# Altium schematic symbol library GNSS_Schlib.SchLib: 14 symbols
Pins are listed as number, name and electrical type; pins without a type are passive.

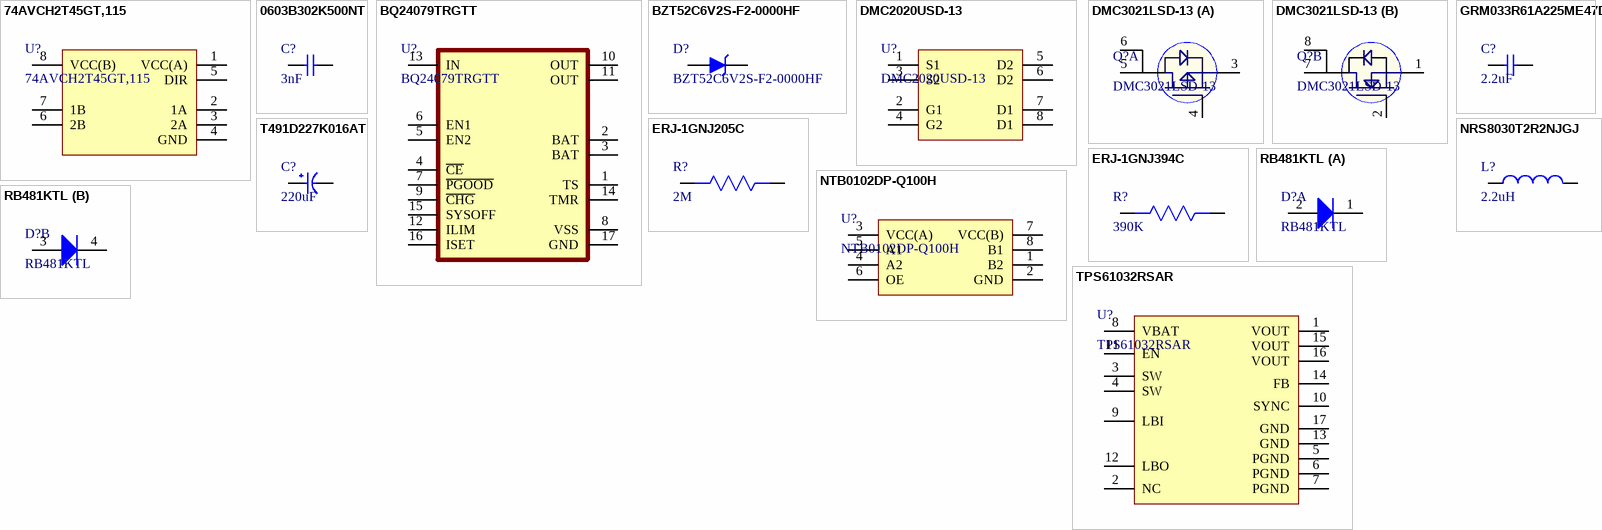
[diagram p0: symbols 74AVCH2T45GT,115 to TPS61032RSAR]

## 74AVCH2T45GT,115
designator U?
IC TXRX BUS 2BIT DUAL 3ST 8XSON; Manufacturer: Nexperia; Supplier 1: Digi-Key; Manufacturer Part Number: 74AVCH2T45GT,115; RoHS: Yes; Category: Voltage Level Shifters; Stock 1: 342616; Pricing 1: 5000=0.19239 (USD); RoHS Compliant: Yes; ComponentLink1URL: https://assets.nexperia.com/documents/data-sheet/74AVCH2T45.pdf?src-supplier=Digi-Key; ComponentLink1Description: https://assets.nexperia.com/documents/data-sheet/74AVCH2T45.pdf?src-supplier=Digi-Key; Supplier Part Number 1: 1727-6903-2-ND
footprint 74AVCH2T45GT,115
pins: 1 VCC(A), 2 1A, 3 2A, 4 GND, 5 DIR, 6 2B, 7 1B, 8 VCC(B)

## 0603B302K500NT
designator C?, comment 3nF
3nF ±10% 50V X7R 0603 Multilayer Ceramic Capacitors MLCC - SMD/SMT RoHS; Manufacturer: FH(Guangdong Fenghua Advanced Tech); Package: 0603; Capacitance: 3nF; Tolerance: ±10%; Voltage - Rated: 50V; Temperature Coefficient: X7R
footprint Cap 0603
pins: 1, 2

## BQ24079TRGTT
designator U?
Battery Charger Li-Ion 1500mA 4.1V 16-Pin VQFN EP T/R; Manufacturer: Texas Instruments; Min Supply Voltage: 4.35V; Max Supply Voltage: 6.4V; Output Current: 1.5A; Max Power Dissipation: 2.3W; Min Input Voltage: 4.3V; Operating Supply Current: 1.5mA; Number of Cells: 1; Supplier 1: Digi-Key; Manufacturer Part Number: BQ24079TRGTT; RoHS: Yes; Category: Battery Management; Stock 1: 10; Pricing 1: 1=3.03000, 10=2.72500, 25=2.57040, 100=2.19010 (USD); Case/Package: VQFN EP; Number of Pins: 16; Contact Plating: Gold; Min Operating Temperature: -40°C; Max Operating Temperature: 85°C; Output Voltage: 4.1V; Packaging: Tape and Reel; Package Quantity: 250; Series: -; Radiation Hardening: No; Lead Free: Lead Free; RoHS Compliant: Yes; ComponentLink1URL: https://datasheet.ciiva.com/15115/getdatasheetpartid-517600-15115033.pdf?src-supplier=Verical; ComponentLink1Description: https://datasheet.ciiva.com/15115/getdatasheetpartid-517600-15115033.pdf?src-supplier=Verical; ComponentLink2URL: https://datasheet.ciiva.com/1934/bq24075t-1934673.pdf?src-supplier=Digi-Key; ComponentLink2Description: https://datasheet.ciiva.com/1934/bq24075t-1934673.pdf?src-supplier=Digi-Key; Supplier Part Number 1: 296-BQ24079TRGTTCT-ND
footprint BQ24079TRGTT
pins: 1 TS, 2 BAT, 3 BAT, 4 ~{CE}, 5 EN2, 6 EN1, 7 ~{PGOOD}, 8 VSS, 9 ~{CHG}, 10 OUT, 11 OUT, 12 ILIM, 13 IN, 14 TMR, 15 SYSOFF, 16 ISET, 17 GND

## BZT52C6V2S-F2-0000HF
designator D?
Zener Diode 6.2V 0.2W SOD-323; Manufacturer: Yangjie Electronic Technology; Supplier 1: Digi-Key; Manufacturer Part Number: BZT52C6V2S-F2-0000HF; RoHS: No; Category: Zener Diodes; Stock 1: 2869; Pricing 1: 1=0.22000, 10=0.17700, 100=0.09400, 500=0.06188, 1000=0.04208 (USD); Supplier Part Number 1: 3191-BZT52C6V2S-F2-0000HFCT-ND
footprint BZT52C6V2S-F2-0000HF
pins: 1 K, 2 A

## DMC2020USD-13
designator U?
MOSFET N/P-CH 20V 7.8A/6.3A 8SO; Manufacturer: Diodes Incorporated; Manfacutrer part num:: DMC2020USD-13; Package: 8-SO
footprint DMC2020USD-13
pins: 1 S1, 2 G1, 3 S2, 4 G2, 5 D2, 6 D2, 7 D1, 8 D1

## DMC3021LSD-13
designator Q?
MOSFET N/P-CH 30V 8.5A/7A 8SO; Manufacturer: Diodes; Gate to Source Voltage (Vgs): 20V; Rds On Max: 21mR; Input Capacitance: 767pF; Number of Elements: 2; Max Power Dissipation: 2.5W; Continuous Drain Current (ID): 8.5A; Drain to Source Resistance: 14mR; Turn-Off Delay Time: 50.1ns; FET Type: N and P-Channel; Polarity: N-CHANNEL,P-CHANNEL; Supplier 1: RSComponents; Manufacturer Part Number: DMC3021LSD-13; RoHS: Yes; Category: MOSFETs; Stock 1: 225; Pricing 1: 25=0.61700, 125=0.47900, 625=0.39900, 1250=0.32000 (USD); Mount: Surface Mount; Case/Package: SOIC; Number of Pins: 8; Weight: 0.00261oz; Min Operating Temperature: -55°C; Max Operating Temperature: 150°C; Packaging: Tape and Reel; Package Quantity: 2500; Power Dissipation: 2.5W; Drain to Source Voltage (Vdss): 30V; Number of Channels: 2; Series: -; Length: 4.95mm; Width: 3.95mm; Height: 1.5mm; Radiation Hardening: No; REACH SVHC: No SVHC; RoHS Compliant: Yes; ComponentLink1URL: https://datasheet.ciiva.com/4443/ds32152-88645-4443219.pdf?src-supplier=Mouser; ComponentLink1Description: https://datasheet.ciiva.com/4443/ds32152-88645-4443219.pdf?src-supplier=Mouser; ComponentLink2URL: https://datasheet.ciiva.com/928/ds32152-928775.pdf?src-supplier=Digi-Key; ComponentLink2Description: https://datasheet.ciiva.com/928/ds32152-928775.pdf?src-supplier=Digi-Key; ComponentLink3URL: https://datasheet.ciiva.com/928/ds32152-928776.pdf?src-supplier=Digi-Key; ComponentLink3Description: https://datasheet.ciiva.com/928/ds32152-928776.pdf?src-supplier=Digi-Key; ComponentLink4URL: https://datasheet.ciiva.com/928/ds32152-928777.pdf?src-supplier=Digi-Key; ComponentLink4Description: https://datasheet.ciiva.com/928/ds32152-928777.pdf?src-supplier=Digi-Key; Supplier Part Number 1: 7514067
footprint DMC2020USD-13
part A pins: 3 S1, 4 G1, 5 D1, 6 D1
part B pins: 1 S2, 2 G2, 7 D2, 8 D2

## ERJ-1GNJ205C
designator R?, comment 2M
Res Thick Film 0201 2M Ohm 5% 1/20W -400ppm/°C to 150ppm/°C Molded SMD SMD T/R; Manufacturer: Panasonic; Manufacturer Part Number: ERJ-1GNJ205C; Resistance: 2MR; Power Rating: 50mW; Voltage Rating: 25V; Supplier 1: Digi-Key; RoHS: Yes; Category: Chip SMD Resistors; Stock 1: 118626; Pricing 1: 1=0.10000, 10=0.03400, 100=0.01400, 1000=0.00629, 2500=0.00546, 5000=0.00451 (USD); Mount: Surface Mount; Case/Package: 0201; Case Code (Metric): 0603; Case Code (Imperial): 0201; Min Operating Temperature: -55°C; Max Operating Temperature: 125°C; Package Quantity: 15000; Tolerance: 5%; Packaging: Tape and Reel; Resistor Type: Thick Film; Number of Terminations: 2; Temperature Coefficient: 150ppm/°C; Max Power Dissipation: 50mW; Termination: SMD/SMT; Length: 0.024inch; Width: 0.012inch; Height: 0.01inch; RoHS Compliant: Yes; ComponentLink1URL: http://www.onlinecomponents.com/datasheet/erj-1gnj205c.aspx?p=44467765&src-supplier=Onlinecomponents.com; ComponentLink1Description: http://www.onlinecomponents.com/datasheet/erj-1gnj205c.aspx?p=44467765&src-supplier=Onlinecomponents.com; ComponentLink2URL: http://www.mouser.com/ds/2/315/AOA0000CE1-37422.pdf?src-supplier=Mouser; ComponentLink2Description: http://www.mouser.com/ds/2/315/AOA0000CE1-37422.pdf?src-supplier=Mouser; ComponentLink3URL: https://b2b-api.panasonic.eu/file_stream/pids/fileversion/1242?src-supplier=Digi-Key; ComponentLink3Description: https://b2b-api.panasonic.eu/file_stream/pids/fileversion/1242?src-supplier=Digi-Key; ComponentLink4URL: http://industrial.panasonic.com/www-cgi/jvcr13pz.cgi?E+PZ+3+AOA0002+ERJ1GNJ205C+7+WW?src-supplier=Digi-Key; ComponentLink4Description: http://industrial.panasonic.com/www-cgi/jvcr13pz.cgi?E+PZ+3+AOA0002+ERJ1GNJ205C+7+WW?src-supplier=Digi-Key; ComponentLink5URL: https://industrial.panasonic.com/cdbs/www-data/pdf/RDM0000/DMM0000COL11.pdf?src-supplier=Digi-Key; ComponentLink5Description: https://industrial.panasonic.com/cdbs/www-data/pdf/RDM0000/DMM0000COL11.pdf?src-supplier=Digi-Key; Supplier Part Number 1: P123274CT-ND
footprint Res-0201
pins: 1, 2

## ERJ-1GNJ394C
designator R?, comment 390K
Res Thick Film 0201 390K Ohm 5% 1/20W ±200ppm/°C Molded SMD SMD T/R; Manufacturer: Panasonic; Manufacturer Part Number: ERJ-1GNJ394C; Resistance: 390kR; Power Rating: 50mW; Voltage Rating: 25V; Supplier 1: Digi-Key; RoHS: Yes; Category: Chip SMD Resistors; Stock 1: 14453; Pricing 1: 1=0.10000, 10=0.03400, 100=0.01400, 1000=0.00629, 2500=0.00546, 5000=0.00451 (USD); Mount: Surface Mount; Case/Package: 0201; Case Code (Imperial): 0201; Case Code (Metric): 0603; Min Operating Temperature: -55°C; Max Operating Temperature: 125°C; Packaging: Tape and Reel; Tolerance: 5%; Package Quantity: 15000; Resistor Type: Thick Film; Max Power Dissipation: 50mW; Number of Terminations: 2; Temperature Coefficient: 200ppm/°C; Length: 0.024inch; Width: 0.3mm; Height: 0.01inch; ComponentLink1URL: http://www.onlinecomponents.com/datasheet/erj-1gnj394c.aspx?p=44467790&src-supplier=Onlinecomponents.com; ComponentLink1Description: http://www.onlinecomponents.com/datasheet/erj-1gnj394c.aspx?p=44467790&src-supplier=Onlinecomponents.com; ComponentLink2URL: http://www.mouser.com/ds/2/315/AOA0000CE1-37422.pdf?src-supplier=Mouser; ComponentLink2Description: http://www.mouser.com/ds/2/315/AOA0000CE1-37422.pdf?src-supplier=Mouser; ComponentLink3URL: http://industrial.panasonic.com/www-cgi/jvcr13pz.cgi?E+PZ+3+AOA0002+ERJ1GNJ394C+7+WW?src-supplier=Digi-Key; ComponentLink3Description: http://industrial.panasonic.com/www-cgi/jvcr13pz.cgi?E+PZ+3+AOA0002+ERJ1GNJ394C+7+WW?src-supplier=Digi-Key; ComponentLink4URL: https://b2b-api.panasonic.eu/file_stream/pids/fileversion/1242?src-supplier=Digi-Key; ComponentLink4Description: https://b2b-api.panasonic.eu/file_stream/pids/fileversion/1242?src-supplier=Digi-Key; Supplier Part Number 1: P123319CT-ND
footprint Res-0201
pins: 1, 2

## GRM033R61A225ME47D
designator C?, comment 2.2uF
CAP CER 2.2UF 10V X5R 0201; Manufacturer: Murata; Manufacturer Part Number: GRM033R61A225ME47D; Tolerance: 20%; Supplier 1: Avnet; RoHS: Yes; Category: Ceramic Capacitors; Pricing 1: 15000=0.04772, 30000=0.04483, 60000=0.04193, 90000=0.03904, 120000=0.03615, 150000=0.03495, 1500000=0.03374 (USD); Mount: Surface Mount; Case/Package: 0201; Case Code (Metric): 0603; Case Code (Imperial): 0201; Min Operating Temperature: -55°C; Max Operating Temperature: 85°C; Packaging: Tape and Reel; Capacitance: 2.2uF; Voltage Rating: 10V; Voltage Rating (DC): 10V; Dielectric: X5R; Length: 0.024inch; Width: 0.012inch; Thickness: 0.015inch; RoHS Compliant: Yes; ComponentLink1URL: http://search.murata.co.jp/Ceramy/image/img/A01X/G101/ENG/GRM033R61A225ME47-01.pdf?src-supplier=Digi-Key; ComponentLink1Description: http://search.murata.co.jp/Ceramy/image/img/A01X/G101/ENG/GRM033R61A225ME47-01.pdf?src-supplier=Digi-Key; ComponentLink2URL: https://www.murata.com/~/media/webrenewal/support/library/catalog/products/capacitor/mlcc/c02e.ashx?la=en-us&src-supplier=Digi-Key; ComponentLink2Description: https://www.murata.com/~/media/webrenewal/support/library/catalog/products/capacitor/mlcc/c02e.ashx?la=en-us&src-supplier=Digi-Key; Supplier Part Number 1: GRM033R61A225ME47D
footprint CAP 0201
pins: 1, 2

## NRS8030T2R2NJGJ
designator L?, comment 2.2uH
Inductor Power Shielded Wirewound 2.2uH 30% 100KHz Ferrite 4.8A 0.0195Ohm DCR 3131 T/R; Manufacturer: Taiyo Yuden; Manufacturer Part Number: NRS8030T2R2NJGJ; Self Resonant Frequency: 60MHz; Max DC Current: 4.9A; DC Resistance (DCR): 19.5mR; Supplier 1: Future Electronics; RoHS: Yes; Category: Fixed Inductors; Stock 1: 16000; Pricing 1: 1000=0.24000, 2000=0.19800, 3000=0.19600, 5000=0.19300, 10000=0.19000 (USD); Mount: Surface Mount; Case/Package: Nonstandard; Number of Pins: 2; Core Material: Ferrite; Min Operating Temperature: -25°C; Max Operating Temperature: 125°C; Inductance: 2.2uH; Tolerance: 30%; Packaging: Cut Tape; Package Quantity: 1000; Current Rating: 4.8A; Shielding: Shielded; Termination: SMD/SMT; Resistor Type: Wirewound; Test Frequency: 100kHz; Saturation Current: 4.9A; Series: NRS; Inductance Tolerance: 30%; RMS Current (Irms): 4.8A; Length: 8mm; Width: 8mm; Height: 3mm; Height - Seated (Max): 0.118inch; Depth: 8.2mm; Lead Pitch: 5.6mm; Radiation Hardening: No; RoHS Compliant: Yes; Lead Free: Lead Free; Halogen Free: Halogen Free; REACH SVHC: Unknown; ComponentLink1URL: https://datasheet.ciiva.com/8504/nrs8030t2r2njgj-ss-8504418.pdf?src-supplier=Avnet; ComponentLink1Description: https://datasheet.ciiva.com/8504/nrs8030t2r2njgj-ss-8504418.pdf?src-supplier=Avnet; ComponentLink2URL: https://datasheet.ciiva.com/6699/nrs8030t2r2njgj-ss-6699093.pdf?src-supplier=Digi-Key; ComponentLink2Description: https://datasheet.ciiva.com/6699/nrs8030t2r2njgj-ss-6699093.pdf?src-supplier=Digi-Key; ComponentLink3URL: https://datasheet.ciiva.com/25607/0900766b810b3cd2-25607146.pdf?src-supplier=RSComponents; ComponentLink3Description: https://datasheet.ciiva.com/25607/0900766b810b3cd2-25607146.pdf?src-supplier=RSComponents; Supplier Part Number 1: 1077538
footprint NRS8030T2R2NJGJ (FIXED IND 2.2UH 4.8A 19.5MOHM SM)
pins: 1, 2

## NTB0102DP-Q100H
designator U?
Voltage Level Translator 2-CH Bidirectional Automotive 8-Pin TSSOP T/R; Manufacturer: NXP Semiconductors; Propagation Delay: 4.4ns; Data Rate: 100Mbps; Number of Channels: 2; Max Supply Voltage: 3.6V; Min Supply Voltage: 1.2V; Max Power Dissipation: 250mW; Nominal Supply Current: 3.3uA; Number of Circuits: 1; Turn-On Delay Time: 5.9ns; Low Level Output Current: 20uA; High Level Output Current: -20uA; Supplier 1: Digi-Key; Manufacturer Part Number: NTB0102DP-Q100H; RoHS: Yes; Category: Logic Gates; Stock 1: 8500; Pricing 1: 1=1.30000, 10=1.16200, 25=1.10240, 100=1.06880 (USD); Mount: Surface Mount; Case/Package: TSSOP; Number of Pins: 8; Min Operating Temperature: -40°C; Max Operating Temperature: 125°C; Packaging: Tape and Reel; Package Quantity: 3000; Channel Type: Bidirectional; Logic Function: Translator; Number of Bits: 2; Output Type: Voltage; Radiation Hardening: No; RoHS Compliant: Yes; ComponentLink1URL: https://datasheet.ciiva.com/29887/ntb0102-q100-29887588.pdf?src-supplier=Avnet; ComponentLink1Description: https://datasheet.ciiva.com/29887/ntb0102-q100-29887588.pdf?src-supplier=Avnet; ComponentLink2URL: https://datasheet.ciiva.com/29615/ntb0102-q100-29615979.pdf?src-supplier=Digi-Key; ComponentLink2Description: https://datasheet.ciiva.com/29615/ntb0102-q100-29615979.pdf?src-supplier=Digi-Key; Supplier Part Number 1: 568-12374-6-ND
footprint NTB0102DP-Q100H
pins: 1 B2, 2 GND, 3 VCC(A), 4 A2, 5 A1, 6 OE, 7 VCC(B), 8 B1

## RB481KTL
designator D?
Diode Small Signal Schottky 30V 0.2A Automotive 4-Pin UMD T/R; Manufacturer: Rohm; Forward Current: 200mA; Peak Non-Repetitive Surge Current: 1A; Forward Voltage: 500mV; Max Reverse Leakage Current: 30uA; Supplier 1: Digi-Key; Manufacturer Part Number: RB481KTL; RoHS: Yes; Category: Schottky Diodes; Stock 1: 154; Pricing 1: 1=0.51000, 10=0.43300, 100=0.32340 (USD); Mount: Surface Mount; Case/Package: SOT-343; Number of Pins: 4; Max Operating Temperature: 125°C; Max Repetitive Reverse Voltage (Vrrm): 30V; Package Quantity: 1; Packaging: Tape and Reel; Max Surge Current: 1A; Average Rectified Current: 200mA; Max Forward Surge Current (Ifsm): 1A; Termination: SMD/SMT; Max Reverse Current: 30uA; Current Rating: 200mA; Voltage Rating (DC): 30V; Max Reverse Voltage (DC): 30V; Series: -; Length: 2mm; Width: 1.25mm; Height: 0.9mm; Radiation Hardening: No; REACH SVHC: No SVHC; Lead Free: Lead Free; RoHS Compliant: Yes; ComponentLink1URL: https://datasheet.ciiva.com/906/rb481k-906368.pdf?src-supplier=Digi-Key; ComponentLink1Description: https://datasheet.ciiva.com/906/rb481k-906368.pdf?src-supplier=Digi-Key; ComponentLink2URL: https://datasheet.ciiva.com/5739/24652-5739061.pdf?src-supplier=Farnell; ComponentLink2Description: https://datasheet.ciiva.com/5739/24652-5739061.pdf?src-supplier=Farnell; ComponentLink3URL: https://datasheet.ciiva.com/25968/rb481k-25968757.pdf?src-supplier=Avnet+Europe; ComponentLink3Description: https://datasheet.ciiva.com/25968/rb481k-25968757.pdf?src-supplier=Avnet+Europe; ComponentLink4URL: https://datasheet.ciiva.com/13083/rb481k-210787-13083722.pdf?src-supplier=Mouser; ComponentLink4Description: https://datasheet.ciiva.com/13083/rb481k-210787-13083722.pdf?src-supplier=Mouser; ComponentLink5URL: https://datasheet.ciiva.com/26325/140681-da-01-en-schottky-diode-rb481ktl-sot-343-26325256.pdf?src-supplier=Conrad; ComponentLink5Description: https://datasheet.ciiva.com/26325/140681-da-01-en-schottky-diode-rb481ktl-sot-343-26325256.pdf?src-supplier=Conrad; ComponentLink6URL: https://datasheet.ciiva.com/16481/rb481k-16481067.pdf?src-supplier=Future+Electronics; ComponentLink6Description: https://datasheet.ciiva.com/16481/rb481k-16481067.pdf?src-supplier=Future+Electronics; Supplier Part Number 1: 846-RB481KTLCT-ND
footprint RB481KTL
part A pins: 1 K, 2 A
part B pins: 3 A, 4 K

## T491D227K016AT
designator C?, comment 220uF
CAP TANT 220UF 10% 16V 2917; Manufacturer: KEMET; Manufacturer Part Number: T491D227K016AT; Dielectric Material: Tantalum; ESR (Equivalent Series Resistance): 900mR; Leakage Current: 35.2uA; Supplier 1: RSComponents; RoHS: Yes; Category: Tantalum Capacitors; Stock 1: 35; Pricing 1: 5=2.59000, 50=2.41000, 100=2.25400, 250=2.09800, 500=1.89100 (USD); Mount: Surface Mount; Case/Package: 2917; Number of Pins: 2; Case Code (Metric): 7343; Case Code (Imperial): 2917; Min Operating Temperature: -55°C; Max Operating Temperature: 125°C; Packaging: Cut Tape; Capacitance: 220uF; Voltage Rating: 16V; Tolerance: 10%; Features: General Purpose; Package Quantity: 1; Voltage: 16V; Termination: SMD/SMT; Voltage Rating (DC): 16V; Series: T491; Construction: Flat; Length: 7.3mm; Width: 0.169inch; Height: 2.8mm; Height - Seated (Max): 0.122inch; Depth: 4.3mm; Radiation Hardening: No; REACH SVHC: No SVHC; Lead Free: Lead Free; RoHS Compliant: Yes; ComponentLink1URL: https://datasheet.ciiva.com/14885/kem-t2005-t491-14885000.pdf?src-supplier=Digi-Key; ComponentLink1Description: https://datasheet.ciiva.com/14885/kem-t2005-t491-14885000.pdf?src-supplier=Digi-Key; ComponentLink2URL: https://datasheet.ciiva.com/14884/kem-t2005-t491-14884999.pdf?src-supplier=Digi-Key; ComponentLink2Description: https://datasheet.ciiva.com/14884/kem-t2005-t491-14884999.pdf?src-supplier=Digi-Key; ComponentLink3URL: https://datasheet.ciiva.com/14885/kem-t2005-t491-14885001.pdf?src-supplier=Digi-Key; ComponentLink3Description: https://datasheet.ciiva.com/14885/kem-t2005-t491-14885001.pdf?src-supplier=Digi-Key; Supplier Part Number 1: 8015479
footprint T491D227K016AT (CAP TANT 220UF 10% 16V 2917)
pins: 1, 2

## TPS61032RSAR
designator U?
5-V Output, 1-A, 96% Efficient Boost Converter w/20uA Iq in TSSOP-16 16-QFN -40 to 85; Manufacturer: Texas Instruments; Number of Outputs: 1; Output Voltage: 5V; Output Current: 1A; Min Input Voltage: 1.8V; Max Input Voltage: 5.5V; Switching Frequency: 600kHz; Synchronous Rectifier: Yes; Quiescent Current: 20uA; Output Type: Fixed; Output Configuration: Positive; Supplier 1: Digi-Key; Manufacturer Part Number: TPS61032RSAR; RoHS: Yes; Category: Voltage Regulators - Switching; Stock 1: 5439; Pricing 1: 1=3.13000, 10=2.80800, 25=2.65440, 100=2.30060, 250=2.18260, 500=1.95844, 1000=1.94775 (USD); Mount: Surface Mount; Case/Package: VQFN; Number of Pins: 16; Weight: 0.001464oz; Min Operating Temperature: -40°C; Max Operating Temperature: 85°C; Efficiency: 96%; Packaging: Tape and Reel; Package Quantity: 1; Max Output Current: 1A; Topology: Boost; Operating Supply Voltage: 5.5V; Series: -; Min Output Voltage: 5V; Nominal Output Voltage: 5V; Width: 4mm; Radiation Hardening: No; Lead Free: Lead Free; RoHS Compliant: Yes; REACH SVHC: No SVHC; ComponentLink1URL: https://datasheet.ciiva.com/15113/getdatasheetpartid-188315-15113727.pdf?src-supplier=Verical; ComponentLink1Description: https://datasheet.ciiva.com/15113/getdatasheetpartid-188315-15113727.pdf?src-supplier=Verical; ComponentLink2URL: https://datasheet.ciiva.com/26896/tps61032rsar-26896598.pdf?src-supplier=IIIC; ComponentLink2Description: https://datasheet.ciiva.com/26896/tps61032rsar-26896598.pdf?src-supplier=IIIC; ComponentLink3URL: https://datasheet.ciiva.com/22684/1902788-22684647.pdf?src-supplier=Element14; ComponentLink3Description: https://datasheet.ciiva.com/22684/1902788-22684647.pdf?src-supplier=Element14; ComponentLink4URL: https://datasheet.ciiva.com/2026/tps61030-2026190.pdf?src-supplier=Digi-Key; ComponentLink4Description: https://datasheet.ciiva.com/2026/tps61030-2026190.pdf?src-supplier=Digi-Key; ComponentLink5URL: https://datasheet.ciiva.com/2026/tps61030-2026189.pdf?src-supplier=Digi-Key; ComponentLink5Description: https://datasheet.ciiva.com/2026/tps61030-2026189.pdf?src-supplier=Digi-Key; ComponentLink6URL: https://datasheet.ciiva.com/2026/tps61030-2026191.pdf?src-supplier=Digi-Key; ComponentLink6Description: https://datasheet.ciiva.com/2026/tps61030-2026191.pdf?src-supplier=Digi-Key; Supplier Part Number 1: 296-16662-6-ND
footprint TPS61032RSAR
pins: 1 VOUT, 2 NC, 3 SW, 4 SW, 5 PGND, 6 PGND, 7 PGND, 8 VBAT, 9 LBI, 10 SYNC, 11 EN, 12 LBO, 13 GND, 14 FB, 15 VOUT, 16 VOUT, 17 GND